# Altium footprint library PcbLib1.PcbLib: 11 footprints
Each footprint in its own frame and in the unit in brackets; x right, y up, seen from the top. Pads: shape width x height; smd on the part's side, far side on the other; paste and mask are expansions set on the pad; w line width, h text height; cw(c..) or ccw(c..) is an arc to the next point about the centre after c.
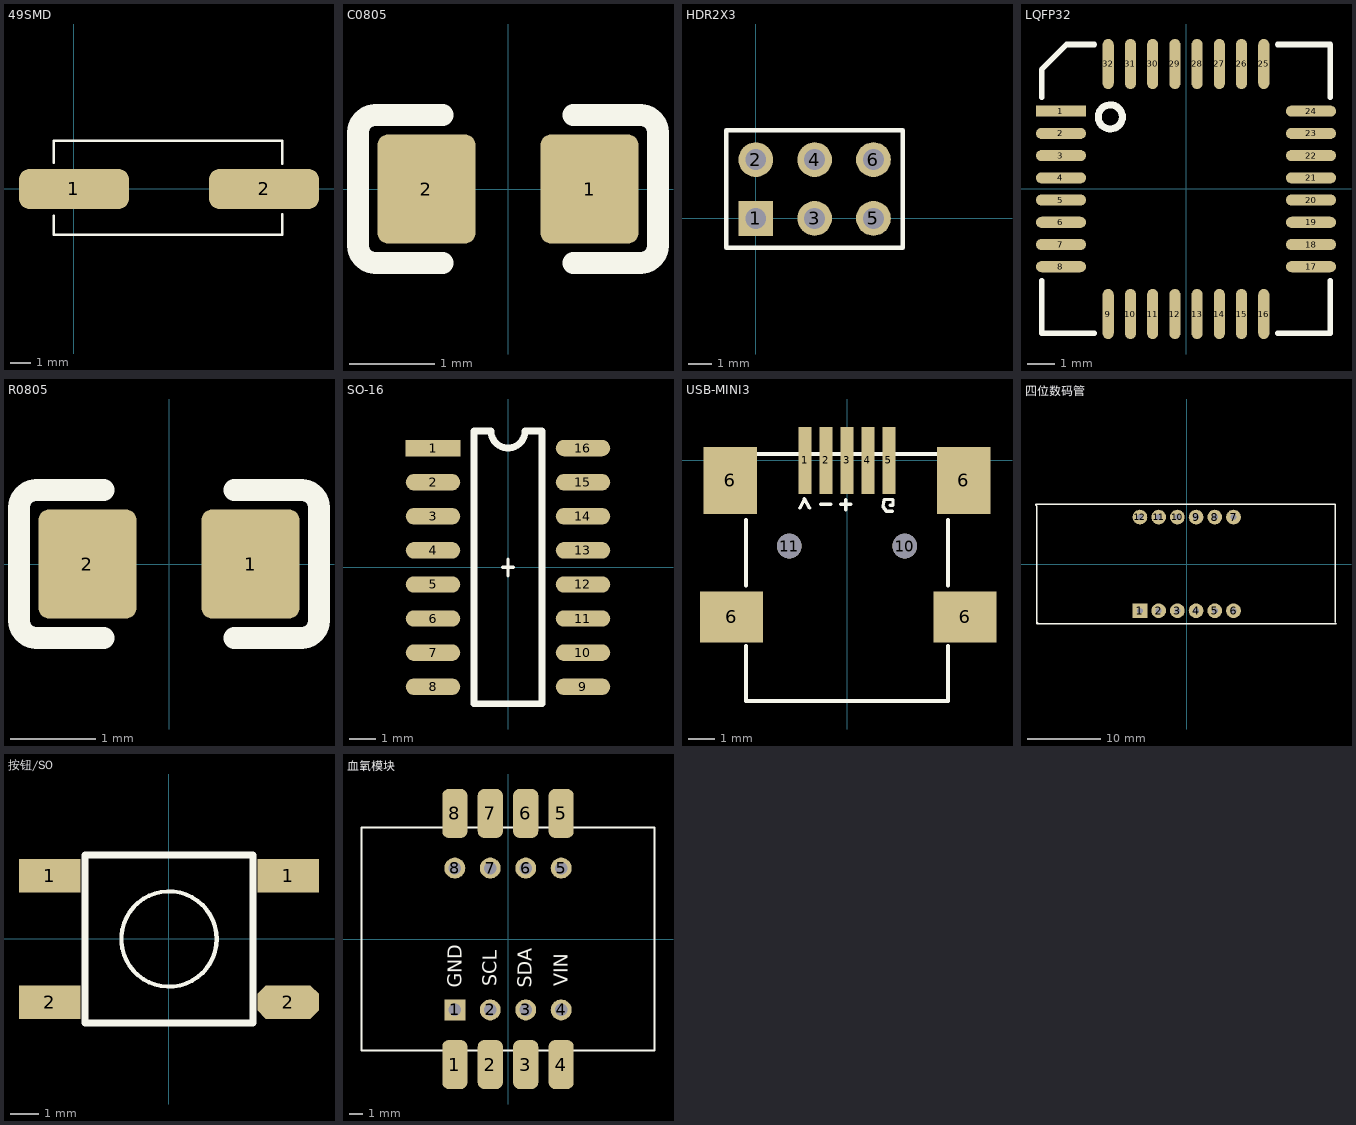
[diagram p0: the footprints below, top view; thin cyan lines are the x and y axes]

## 49SMD [mm]
height 3
pads (2):
  rrect50% 5.5x2 smd: 1(0,0) 2(9.5,0)
Top Overlay:
  lines w0.127: -1.016,-1.346 -1.016,-2.287 10.414,-2.286 10.414,-1.27 ; -1.016,1.321 -1.016,2.413 10.414,2.413 10.414,1.27
3D body "User Library-ECS-240-20-5PX-TR.STEP": height 4.3, standoff 0, extent -1.901,-2.273 11.299,2.527

## C0805 [mil]
pads (2):
  rrect20% 45x50 smd: 1(37.5,0) 2(-37.5,0)
Top Overlay:
  lines w10: -30,-34 -61,-34 cw(c-61,-26) -69,-26 -69,26 cw(c-61,26) -61,34 -30,34 ; 30,-34 61,-34 ccw(c61,-26) 69,-26 69,26 ccw(c61,26) 61,34 30,34
3D body "User Library-SMD CAPACITOR0805.STEP": height 23.62, standoff 0, extent -37.37,-24.21 41.37,25

## HDR2X3 [mm] "Connector; Header; 3x2 Position"
height 10.16
pads (6):
  rect 1.5x1.5 hole 0.9: 1(0,0)
  round 1.5 hole 0.9: 2(0,2.54) 3(2.54,0) 4(2.54,2.54) 5(5.08,0) 6(5.08,2.54)
Top Overlay:
  lines w0.2: -1.27,-1.27 6.35,-1.27 6.35,3.81 -1.27,3.81 -1.27,-1.27
3D body "User Library-Header3x2_100_TH.STEP": height 8.7, standoff -2.28, extent -1.275,-1.27 6.345,3.81

## LQFP32 [mm] "RS_R5F212G4"
pads (32):
  rect 1.8x0.4 smd: 1(-4.5,2.8)
  oval 1.8x0.4 smd: 2(-4.5,2) 3(-4.5,1.2) 4(-4.5,0.4) 5(-4.5,-0.4) 6(-4.5,-1.2) 7(-4.5,-2) 8(-4.5,-2.8) 17(4.5,-2.8) 18(4.5,-2) 19(4.5,-1.2) 20(4.5,-0.4) 21(4.5,0.4) 22(4.5,1.2) 23(4.5,2) 24(4.5,2.8)
  oval 0.4x1.8 smd: 9(-2.8,-4.502) 10(-2,-4.502) 11(-1.2,-4.502) 12(-0.4,-4.502) 13(0.4,-4.502) 14(1.2,-4.502) 15(2,-4.502) 16(2.8,-4.502) 25(2.8,4.498) 26(2,4.498) 27(1.2,4.498) 28(0.4,4.498) 29(-0.4,4.498) 30(-1.2,4.498) 31(-2,4.498) 32(-2.8,4.498)
Top Overlay:
  circle w0.254: c-2.724,2.594 r0.434
  lines w0.2: -5.2,-3.3 -5.2,-5.2 -3.3,-5.2 ; -5.2,3.3 -5.2,4.3 -4.3,5.2 -3.3,5.2 ; 3.3,-5.2 5.2,-5.2 5.2,-3.3 ; 3.3,5.2 5.2,5.2 5.2,3.3
3D body "User Library-PQFP_32_P0_8.STEP": height 1.6, standoff -0.05, extent -4.5,-4.498 4.5,4.502

## PCBComponent_1 [mm]

## R0805 [mil]
pads (2):
  rrect20% 45x50 smd: 1(37.5,0) 2(-37.5,0)
Top Overlay:
  lines w10: -30,-34 -61,-34 cw(c-61,-26) -69,-26 -69,26 cw(c-61,26) -61,34 -30,34 ; 30,-34 61,-34 ccw(c61,-26) 69,-26 69,26 ccw(c61,26) 61,34 30,34
3D body "R0805.STEP": height 17.76, standoff 0, extent -40,-25 38.74,24.21

## SO-16 [mil]
height 110
pads (16):
  rect 80x24 smd: 1(-110,175)
  oval 80x24 smd: 2(-110,125) 3(-110,75) 4(-110,25) 5(-110,-25) 6(-110,-75) 7(-110,-125) 8(-110,-175) 9(110,-175) 10(110,-125) 11(110,-75) 12(110,-25) 13(110,25) 14(110,75) 15(110,125) 16(110,175)
Top Overlay:
  lines w5: -8,0 8,0 ; 0,-12 0,12
  lines w10: -50,-200 -50,200 -25,200 ccw(c0,200) 25,200 50,200 50,-200 -50,-200
3D body "SOP16_Y.stp": height 66.14, standoff 0, extent -148.83,-196.7 150.83,197

## USB-MINI3 [mil] "SMD"
pads (11):
  rect 20x100 smd: 1(-62.99,0) 2(-31.5,0) 3(0,0) 4(31.5,0) 5(62.99,0)
  rect 80x100 smd: 6(-175,-30) 6(175,-30)
  rect 94.49x76.77 smd: 6(-173.23,-234.72) 6(177.17,-234.72)
  round 37 hole 37 unplated: 10(86.61,-128.43) 11(-86.61,-128.43)
Top Overlay:
  lines w5: -70.85,-71.41 -63.96,-57.64 -56.09,-71.41 ; -39.36,-65.51 -24.6,-65.51 ; -9.84,-65.51 5.9,-65.51 ; -1.97,-74.36 -1.97,-58.62 ; 65,-67.48 69.02,-67.48 ; 67.9,-76.33 59.04,-76.33 54.12,-69.44 56.09,-58.62 68.88,-58.62 68.88,-67.48
  lines w6: -151.57,-278.03 -151.57,-360.71 151.57,-360.71 151.57,-278.03 ; -151.57,-187.48 -151.57,-89.06 ; -149.61,9.37 149.61,9.37 ; 151.57,-187.48 151.57,-89.06
3D body "USB2066-05-RBHM-15-STB-00-01-A_revD.STEP": height 153.58, standoff -43.31, extent -194.88,-358.23 194.88,11.68

## 四位数码管 [mm]
pads (12):
  rect 2x2 hole 0.8: 1(-6.33,-6.3)
  round 2 hole 0.8: 2(-3.79,-6.3) 3(-1.25,-6.3) 4(1.29,-6.3) 5(3.83,-6.3) 6(6.37,-6.3) 7(6.37,6.4) 8(3.83,6.4) 9(1.29,6.4) 10(-1.25,6.4) 11(-3.79,6.4) 12(-6.33,6.4)
Top Overlay:
  lines w0.254: -20.33,-8.062 -20.33,7.938 ; -20.23,-7.962 -20.23,-8.062 20.27,-8.062 ; 20.07,8.138 -20.43,8.138 ; 20.17,-7.862 20.17,8.138 ; -20.43,8.138 -20.43,8.038 -20.43,8.138

## 按钮/SO [mm]
pads (4):
  rect 2.2x1.2 smd: 1(-4.25,2.25) 1(4.25,2.25) 2(-4.25,-2.25)
  oct 2.2x1.2 smd: 2(4.25,-2.25)
Top Overlay:
  circle w0.15: c0,0 r1.7
  lines w0.254: -3,-3 -3,3 3,3 3,-3 -3,-3
3D body "PUSH BUTTON-3.STEP": height 4.44, standoff -0.1, extent -4.975,-3.025 5.025,2.975

## 血氧模块 [mm]
height 1.6
pads (16):
  rrect50% 1.8x3.5 smd: 1(-3.81,-9) 2(-1.27,-9) 3(1.27,-9) 4(3.81,-9) 5(3.81,9) 6(1.27,9) 7(-1.27,9) 8(-3.81,9)
  rect 1.5x1.5 hole 0.9: 1(-3.81,-5.08)
  round 1.5 hole 0.9: 2(-1.27,-5.08) 3(1.27,-5.08) 4(3.81,-5.08) 5(3.81,5.08) 6(1.27,5.08) 7(-1.27,5.08) 8(-3.81,5.08)
Top Overlay:
  lines w0.154: -10.5,-8 10.5,-8 10.5,8 -10.5,8 -10.5,-8
  text "GND" at -3.3,-3.5 h1
  text "SCL" at -0.8,-3.4 h1
  text "SDA" at 1.7,-3.5 h1
  text "VIN" at 4.3,-3.4 h1